# Altium schematic symbol library ESP32-P4NRW32.SchLib: 1 symbol
Pins are listed as number, name and electrical type; pins without a type are passive.

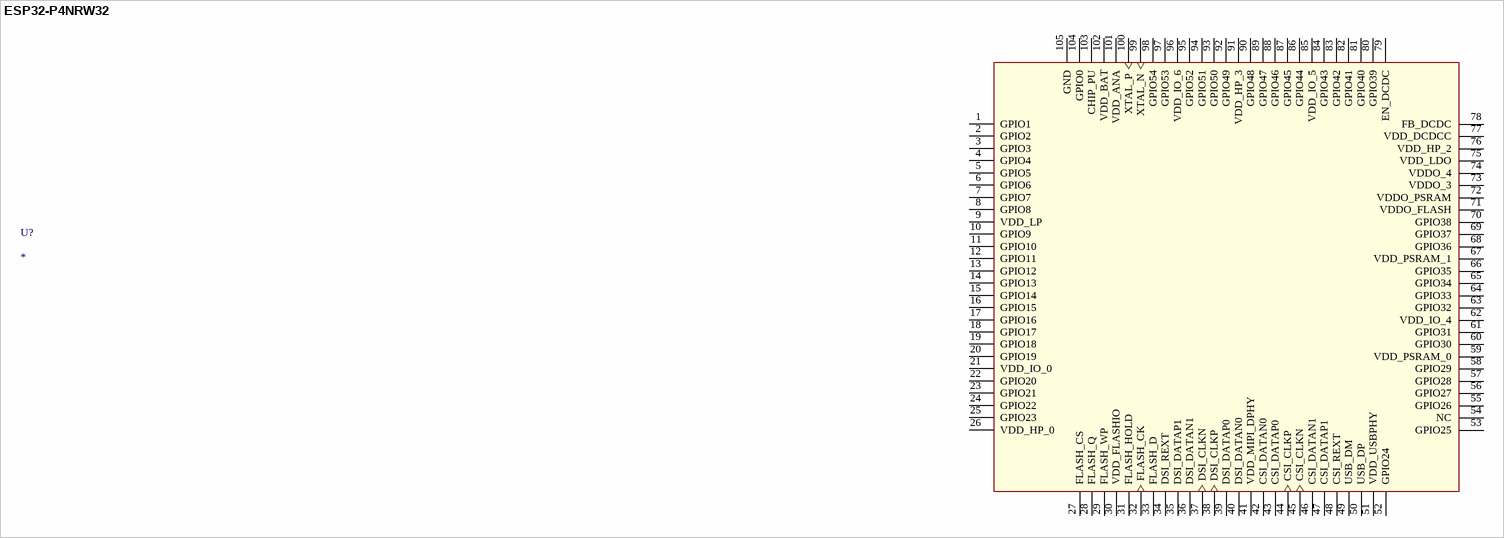
[diagram p0: symbol ESP32-P4NRW32]

## ESP32-P4NRW32
designator U?
High-performance MCU with one RISC-V 32-bit dual-core microprocessor; MF: Espressif Systems; MP: ESP32-P4NRW32; SnapEDA_Link: https://www.snapeda.com/parts/ESP32-P4NRW32/Espressif+Systems/view-part/?ref=snap; Package: None; Value: *; Check_prices: https://www.snapeda.com/parts/ESP32-P4NRW32/Espressif+Systems/view-part/?ref=eda
footprint IC_ESP32-P4NRW32
pins: 1 GPIO1, 2 GPIO2, 3 GPIO3, 4 GPIO4, 5 GPIO5, 6 GPIO6, 7 GPIO7, 8 GPIO8, 9 VDD_LP, 10 GPIO9, 11 GPIO10, 12 GPIO11, 13 GPIO12, 14 GPIO13, 15 GPIO14, 16 GPIO15, 17 GPIO16, 18 GPIO17, 19 GPIO18, 20 GPIO19, 21 VDD_IO_0, 22 GPIO20, 23 GPIO21, 24 GPIO22, 25 GPIO23, 26 VDD_HP_0, 27 FLASH_CS, 28 FLASH_Q, 29 FLASH_WP, 30 VDD_FLASHIO, 31 FLASH_HOLD, 32 FLASH_CK, 33 FLASH_D, 34 DSI_REXT, 35 DSI_DATAP1, 36 DSI_DATAN1, 37 DSI_CLKN, 38 DSI_CLKP, 39 DSI_DATAP0, 40 DSI_DATAN0, 41 VDD_MIPI_DPHY, 42 CSI_DATAN0, 43 CSI_DATAP0, 44 CSI_CLKP, 45 CSI_CLKN, 46 CSI_DATAN1, 47 CSI_DATAP1, 48 CSI_REXT, 49 USB_DM, 50 USB_DP, 51 VDD_USBPHY, 52 GPIO24, 53 GPIO25, 54 NC, 55 GPIO26, 56 GPIO27, 57 GPIO28, 58 GPIO29, 59 VDD_PSRAM_0, 60 GPIO30, 61 GPIO31, 62 VDD_IO_4, 63 GPIO32, 64 GPIO33, 65 GPIO34, 66 GPIO35, 67 VDD_PSRAM_1, 68 GPIO36, 69 GPIO37, 70 GPIO38, 71 VDDO_FLASH, 72 VDDO_PSRAM, 73 VDDO_3, 74 VDDO_4, 75 VDD_LDO, 76 VDD_HP_2, 77 VDD_DCDCC, 78 FB_DCDC, 79 EN_DCDC, 80 GPIO39, 81 GPIO40, 82 GPIO41, 83 GPIO42, 84 GPIO43, 85 VDD_IO_5, 86 GPIO44, 87 GPIO45, 88 GPIO46, 89 GPIO47, 90 GPIO48, 91 VDD_HP_3, 92 GPIO49, 93 GPIO50, 94 GPIO51, 95 GPIO52, 96 VDD_IO_6, 97 GPIO53, 98 GPIO54, 99 XTAL_N, 100 XTAL_P, 101 VDD_ANA, 102 VDD_BAT, 103 CHIP_PU, 104 GPIO0, 105 GND